# Altium footprint library CustomCase.PcbLib: 411 footprints (part 9 of 26)
Each footprint in its own frame and in the unit in brackets; x right, y up, seen from the top. Pads: shape width x height; smd on the part's side, far side on the other; paste and mask are expansions set on the pad; w line width, h text height; cw(c..) or ccw(c..) is an arc to the next point about the centre after c.
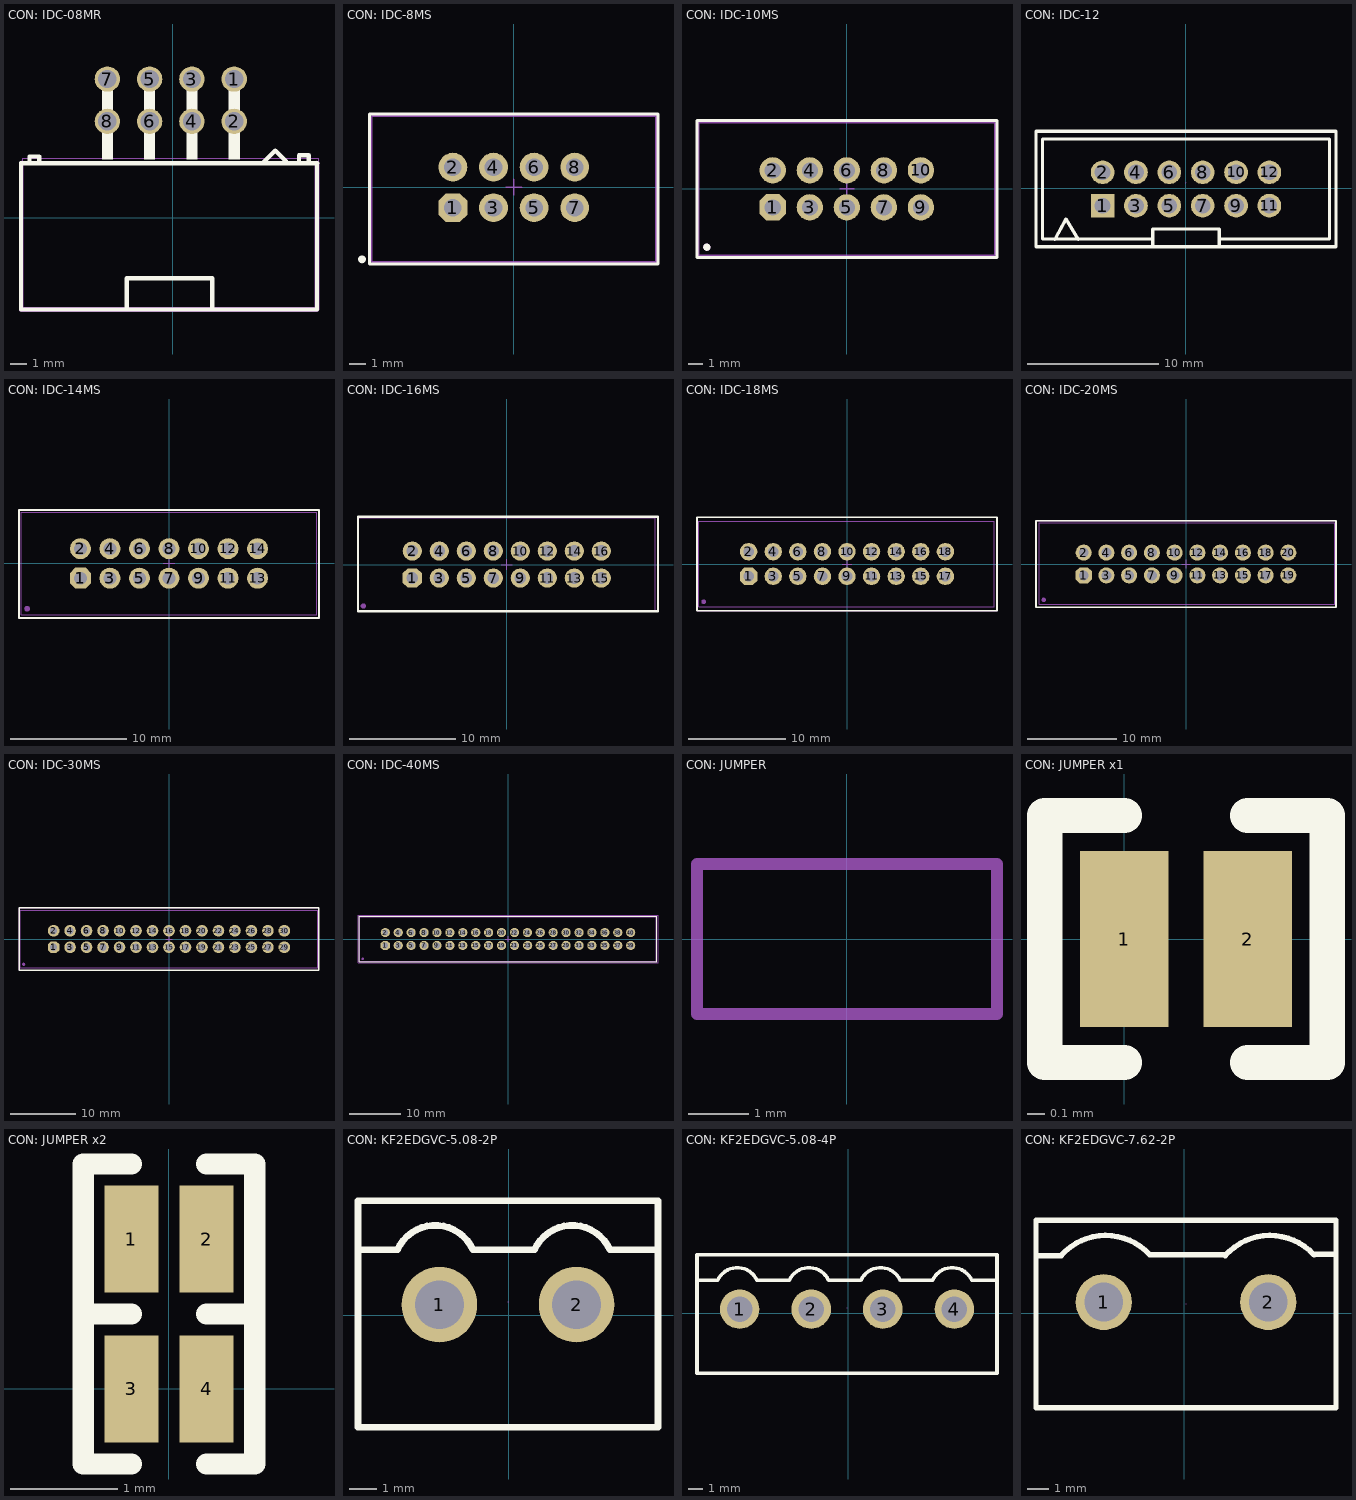
[diagram p8: the footprints below, top view; thin cyan lines are the x and y axes]

## CON: IDC-08MR [mil]
pads (8):
  round 60 hole 43.3: 1(145.59,328.15) 2(145.59,228.15) 3(45.59,328.15) 4(45.59,228.15) 5(-54.41,328.15) 6(-54.41,228.15) 7(-154.41,328.15) 8(-154.41,228.15)
Top Overlay:
  region: 158.19,340.75 132.99,340.75 132.99,138.35 158.19,138.35
  region: 58.19,340.75 32.99,340.75 32.99,138.35 58.19,138.35
  region: -41.81,340.75 -67.01,340.75 -67.01,138.35 -41.81,138.35
  region: -141.81,340.75 -167.01,340.75 -167.01,138.35 -141.81,138.35
  lines w10: -358.31,129.65 -358.31,-216.85 341.09,-216.85 341.09,129.65 ; -357.41,129.15 341.89,129.15 ; -338.41,129.15 -338.41,145.15 -315.41,145.15 -315.41,128.15 ; -109.41,-215.85 -108.41,-214.85 -108.41,-142.85 91.59,-142.85 ; 93.59,-142.85 93.59,-213.85 94.59,-214.85 ; 215.59,131.15 215.59,132.15 242.59,159.15 267.59,134.15 ; 298.59,132.15 298.59,148.15 321.59,148.15 321.59,131.15
Bottom Assy:
  region: -363.31,129.65 -363.31,-216.85 -362.91,-218.75 -361.81,-220.35 -360.21,-221.45 -358.31,-221.85 341.09,-221.85 342.99,-221.45 344.59,-220.35 345.69,-218.75 346.09,-216.85 346.09,129.65 345.69,131.55 344.59,133.15 342.99,134.25 341.09,134.65 339.09,134.25 337.49,133.15 336.39,131.55 336.09,129.65 336.09,-211.85 -353.31,-211.85 -353.31,129.65 -353.71,131.55 -354.81,133.15 -356.41,134.25 -358.31,134.65 -360.21,134.25 -361.81,133.15 -362.91,131.55
Mechanical 6:
  lines w2: -354.61,-213.95 345.79,-213.95 345.79,140.35 -354.61,140.35 -354.61,-213.95
Top Designator:
  region: -141.81,340.75 -167.01,340.75 -167.01,315.55 -141.81,315.55
  region: 158.19,240.75 132.99,240.75 132.99,215.55 158.19,215.55
  region: 158.19,340.75 132.99,340.75 132.99,315.55 158.19,315.55
  region: 58.19,240.75 32.99,240.75 32.99,215.55 58.19,215.55
  region: 58.19,340.75 32.99,340.75 32.99,315.55 58.19,315.55
  region: -41.81,240.75 -67.01,240.75 -67.01,215.55 -41.81,215.55
  region: -41.81,340.75 -67.01,340.75 -67.01,315.55 -41.81,315.55
  region: -141.81,240.75 -167.01,240.75 -167.01,215.55 -141.81,215.55
3D body "IDC-8MR.STEP": height 360.24, standoff -114.96, extent -354.53,-180.51 345.47,339.96

## CON: IDC-8MS [mm]
height 10
pads (9):
  oct 1.8x1.8 hole 1.1: 1(-3.81,-1.27)
  round 1.8 hole 1.1: 2(-3.81,1.27) 3(-1.27,-1.27) 4(-1.27,1.27) 5(1.27,-1.27) 6(1.27,1.27) 7(3.81,-1.27) 8(3.81,1.27)
  round 0.5 on Top Overlay: ""(-9.5,-4.5)
Top Overlay:
  lines w0.2: -9.025,-4.8 9.025,-4.8 9.025,4.6 -9.025,4.6 -9.025,-4.8
Top Assy:
  lines w0.1: -8.89,-4.65 8.89,-4.65 8.89,4.45 -8.89,4.45 -8.89,-4.65
Size Area:
  lines w0.1: -0.5,0 0.5,0 ; 0,-0.5 0,0.5 ; -8.975,-4.75 8.975,-4.75 8.975,4.55 -8.975,4.55 -8.975,-4.75
3D body "6666.STEP": height 8.9, standoff -3.2, extent -8.89,-4.65 8.89,4.45

## CON: IDC-10MS [mm] "IDC-10MS 10 pin PCB-mount header"
height 10
pads (12):
  oct 1.8x1.8 hole 1.1: 1(-5.08,-1.27)
  round 1.8 hole 1.1: 2(-5.08,1.27) 3(-2.54,-1.27) 4(-2.54,1.27) 5(0,-1.27) 6(0,1.27) 7(2.54,-1.27) 8(2.54,1.27) 9(5.08,-1.27) 10(5.08,1.27)
  round 0.5 on Mech1: ""(-9.6,-4)
  round 0.5 on Top Overlay: ""(-9.6,-4)
Top Overlay:
  lines w0.2: -10.275,-4.7 -10.275,4.675 10.3,4.675 10.3,-4.7 -10.275,-4.7
Top Assy:
  lines w0.1: -10.14,-4.572 10.16,-4.572 10.16,4.528 -10.14,4.528 -10.14,-4.572
Size Area:
  lines w0.1: -0.5,0 0.5,0 ; 0,-0.5 0,0.5 ; -10.225,-4.65 -10.225,4.625 10.25,4.625 10.25,-4.65 -10.225,-4.65
3D body "IDC-10MS.STEP": height 9, standoff -3.1, extent -10.14,-4.572 10.16,4.528

## CON: IDC-12 [mm]
pads (12):
  rect 1.8x1.8 hole 1.2: 1(-6.335,-1.311)
  round 1.8 hole 1.2: 2(-6.335,1.229) 3(-3.795,-1.311) 4(-3.795,1.229) 5(-1.255,-1.311) 6(-1.255,1.229) 7(1.285,-1.311) 8(1.285,1.229) 9(3.825,-1.311) 10(3.825,1.229) 11(6.359,-1.306) 12(6.365,1.229)
Top Overlay:
  lines w0.254: -9.975,-3.862 -9.129,-2.327 -8.197,-3.862 ; -2.525,-4.359 -2.525,-3.089 2.555,-3.089 2.555,-4.359 ; -2.525,-3.851 -10.907,-3.851 -10.907,3.769 10.937,3.769 10.937,-3.851 2.555,-3.851 ; -11.405,-4.441 11.435,-4.441 11.435,4.359 -11.405,4.359 -11.405,-4.441
Size Area:
  lines w0.003: -0.01,0.369 0.04,0.42
3D body "IDC-12way.STEP": height 8.9, standoff -3.2, extent -11.415,-4.466 11.445,4.634

## CON: IDC-14MS [mm] "IDC-14MS connector"
height 9
pads (15):
  oct 1.8x1.8 hole 1.1: 1(-7.62,-1.27)
  round 1.8 hole 1.1: 2(-7.62,1.27) 3(-5.08,-1.27) 4(-5.08,1.27) 5(-2.54,-1.27) 6(-2.54,1.27) 7(0,-1.27) 8(0,1.27) 9(2.54,-1.27) 10(2.54,1.27) 11(5.08,-1.27) 12(5.08,1.27) 13(7.62,-1.27) 14(7.62,1.27)
  round 0.5 on Mech1: 38(-12.2,-3.9)
Top Overlay:
  lines w0.2: -12.9,-4.7 -12.9,4.6 12.9,4.6 12.9,-4.7 -12.9,-4.7
Top Assy:
  lines w0.1: -12.7,-4.4 12.7,-4.4 12.7,4.4 -12.7,4.4 -12.7,-4.4
Size Area:
  lines w0.1: -0.5,0 0.5,0 ; 0,-0.5 0,0.5 ; -12.9,-4.7 -12.9,4.6 12.9,4.6 12.9,-4.7 -12.9,-4.7
3D body "IDC-14MS.STEP": height 9.1, standoff -3, extent -12.715,-4.4 12.715,4.4

## CON: IDC-16MS [mm] "IDC-16MS straight leads pcb mount"
height 9
pads (17):
  oct 1.8x1.8 hole 1.1: 1(-8.89,-1.27)
  round 1.8 hole 1.1: 2(-8.89,1.27) 3(-6.35,-1.27) 4(-6.35,1.27) 5(-3.81,-1.27) 6(-3.81,1.27) 7(-1.27,-1.27) 8(-1.27,1.27) 9(1.27,-1.27) 10(1.27,1.27) 11(3.81,-1.27) 12(3.81,1.27) 13(6.35,-1.27) 14(6.35,1.27) 15(8.89,-1.27) 16(8.89,1.27)
  round 0.5 on Mech1: 39(-13.5,-3.9)
Top Overlay:
  lines w0.2: -14,-4.4 -14,4.5 14.224,4.5 14.224,-4.4 -14,-4.4
Top Assy:
  lines w0.1: -13.985,-4.4 13.985,-4.4 13.985,4.4 -13.985,4.4 -13.985,4.285 -13.985,-4.4
Size Area:
  lines w0.1: -0.5,0 0.5,0 ; 0,-0.5 0,0.5 ; -14,-4.4 -14,4.5 14.224,4.5 14.224,-4.4 -14,-4.4
3D body "IDC-16MS.STEP": height 9.1, standoff -3, extent -13.985,-4.4 13.985,4.4

## CON: IDC-18MS [mm]
height 10
pads (19):
  oct 1.8x1.8 hole 1.1: 1(-10.16,-1.27)
  round 1.8 hole 1.1: 2(-10.16,1.27) 3(-7.62,-1.27) 4(-7.62,1.27) 5(-5.08,-1.27) 6(-5.08,1.27) 7(-2.54,-1.27) 8(-2.54,1.27) 9(0,-1.27) 10(0,1.27) 11(2.54,-1.27) 12(2.54,1.27) 13(5.08,-1.27) 14(5.08,1.27) 15(7.62,-1.27) 16(7.62,1.27) 17(10.16,-1.27) 18(10.16,1.27)
  round 0.5 on Mech1: 40(-14.8,-3.9)
Top Overlay:
  lines w0.2: -15.494,-4.826 -15.494,4.826 15.494,4.826 15.494,-4.826 -15.494,-4.826
Top Assy:
  lines w0.1: -15.3,-4.4 15.2,-4.4 15.2,4.4 -15.3,4.4 -15.3,-4.4
Size Area:
  lines w0.1: -0.5,0 0.5,0 ; 0,-0.5 0,0.5 ; -15.494,-4.826 -15.494,4.826 15.494,4.826 15.494,-4.826 -15.494,-4.826
3D body "IDC-18MS.STEP": height 10.54, standoff -1, extent -15.28,-4.378 15.23,4.422

## CON: IDC-20MS [mm]
height 10
pads (21):
  oct 1.8x1.8 hole 1.1: 1(-11.43,-1.27)
  round 1.8 hole 1.1: 2(-11.43,1.27) 3(-8.89,-1.27) 4(-8.89,1.27) 5(-6.35,-1.27) 6(-6.35,1.27) 7(-3.81,-1.27) 8(-3.81,1.27) 9(-1.27,-1.27) 10(-1.27,1.27) 11(1.27,-1.27) 12(1.27,1.27) 13(3.81,-1.27) 14(3.81,1.27) 15(6.35,-1.27) 16(6.35,1.27) 17(8.89,-1.27) 18(8.89,1.27) 19(11.43,-1.27) 20(11.43,1.27)
  round 0.5 on Mech1: 41(-15.9,-4)
Top Overlay:
  lines w0.2: -16.764,-4.826 -16.764,4.826 16.764,4.826 16.764,-4.826 -16.764,-4.826
Top Assy:
  lines w0.1: -16.4,-4.5 16.6,-4.5 16.6,4.6 -16.4,4.6 -16.4,-4.5
Size Area:
  lines w0.1: -0.5,0 0.5,0 ; 0,-0.5 0,0.5 ; -16.764,-4.826 -16.764,4.826 16.764,4.826 16.764,-4.826 -16.764,-4.826
3D body "IDC-20MS.STEP": height 9, standoff -3, extent -16.43,-4.52 16.57,4.58

## CON: IDC-30MS [mm]
height 10
pads (31):
  oct 1.8x1.8 hole 1.1: 1(-17.78,-1.27)
  round 1.8 hole 1.1: 2(-17.78,1.27) 3(-15.24,-1.27) 4(-15.24,1.27) 5(-12.7,-1.27) 6(-12.7,1.27) 7(-10.16,-1.27) 8(-10.16,1.27) 9(-7.62,-1.27) 10(-7.62,1.27) 11(-5.08,-1.27) 12(-5.08,1.27) 13(-2.54,-1.27) 14(-2.54,1.27) 15(0,-1.27) 16(0,1.27) 17(2.54,-1.27) 18(2.54,1.27) 19(5.08,-1.27) 20(5.08,1.27) 21(7.62,-1.27) 22(7.62,1.27) 23(10.16,-1.27) 24(10.16,1.27) 25(12.7,-1.27) 26(12.7,1.27) 27(15.24,-1.27) 28(15.24,1.27) 29(17.78,-1.27) 30(17.78,1.27)
  round 0.5 on Mech1: 42(-22.4,-3.9)
Top Overlay:
  lines w0.2: -23.114,-4.826 -23.114,4.826 23.114,4.826 23.114,-4.826 -23.114,-4.826
Top Assy:
  lines w0.1: -22.9,-4.4 22.9,-4.4 22.9,4.4 -22.9,4.4 -22.9,-4.4
Size Area:
  lines w0.1: -0.5,0 0.5,0 ; 0,-0.5 0,0.5 ; -23.114,-4.826 -23.114,4.826 23.114,4.826 23.114,-4.826 -23.114,-4.826
3D body "IDC-30MS.STEP": height 8.78, standoff -3, extent -22.881,-4.392 22.869,4.408

## CON: IDC-40MS [mm]
height 10
pads (41):
  oct 1.8x1.8 hole 1.1: 1(-24.13,-1.27)
  round 1.8 hole 1.1: 2(-24.13,1.27) 3(-21.59,-1.27) 4(-21.59,1.27) 5(-19.05,-1.27) 6(-19.05,1.27) 7(-16.51,-1.27) 8(-16.51,1.27) 9(-13.97,-1.27) 10(-13.97,1.27) 11(-11.43,-1.27) 12(-11.43,1.27) 13(-8.89,-1.27) 14(-8.89,1.27) 15(-6.35,-1.27) 16(-6.35,1.27) 17(-3.81,-1.27) 18(-3.81,1.27) 19(-1.27,-1.27) 20(-1.27,1.27) 21(1.27,-1.27) 22(1.27,1.27) 23(3.87,-1.27) 24(3.81,1.27) 25(6.35,-1.27) 26(6.35,1.27) 27(8.89,-1.27) 28(8.89,1.27) 29(11.43,-1.27) 30(11.43,1.27) 31(13.97,-1.27) 32(13.97,1.27) 33(16.51,-1.27) 34(16.51,1.27) 35(19.05,-1.27) 36(19.05,1.27) 37(21.59,-1.27) 38(21.59,1.27) 39(24.13,-1.27) 40(24.13,1.27)
  round 0.5 on Mech1: 43(-28.6,-3.9)
Top Overlay:
  lines w0.2: -29.3,-4.5 29.3,-4.5 29.3,4.5 -29.3,4.5 -29.3,-4.5
Top Assy:
  lines w0.1: -29.2,-4.4 -29.2,4.4 29.2,4.4 29.2,-4.4 -29.2,-4.4
Size Area:
  lines w0.1: -0.5,0 0.5,0 ; 0,-0.5 0,0.5 ; -29.5,-4.7 29.5,-4.7 29.5,4.7 -29.5,4.7 -29.5,-4.7
3D body "IDC-40MS.STEP": height 8.78, standoff -3, extent -29.225,-4.4 29.225,4.4

## CON: JUMPER [mm]
Top Assy:
  lines w0.2: -2.5,-1.25 1,-1.25 2.5,-1.25 2.5,1.25 1,1.25 -2.5,1.25 -2.5,-1.25
3D body "JUMPER.step": height 6.5, standoff 0, extent -2.5,-1.175 2.5,1.175

## CON: JUMPER x1 [mm]
pads (2):
  rect 0.5x1 smd: 1(0,0) 2(0.7,0)
Top Overlay:
  lines w0.2: 0,-0.7 -0.45,-0.7 -0.45,0.7 0,0.7 ; 0.7,-0.7 1.15,-0.7 1.15,0.7 0.7,0.7

## CON: JUMPER x2 [mm]
pads (4):
  rect 0.5x1 smd: 1(-0.35,1.4) 2(0.35,1.4) 3(-0.35,0) 4(0.35,0)
Top Overlay:
  lines w0.2: -0.35,-0.7 -0.8,-0.7 -0.8,0.7 ; -0.35,2.1 -0.8,2.1 -0.8,0.7 ; 0.35,-0.7 0.8,-0.7 0.8,0.7 ; 0.35,2.1 0.8,2.1 0.8,0.7 ; -0.8,0.7 -0.35,0.7 -0.8,0.7 ; 0.8,0.7 0.35,0.7 0.8,0.7

## CON: KF2EDGVC-5.08-2P [mm]
pads (2):
  round 2.8 hole 1.8: 1(-2.564,0.403) 2(2.516,0.403)
Top Overlay:
  lines w0.254: -5.584,2.435 -4.121,2.435 cw(c-2.724,1.81) -1.327,2.435 0.959,2.435 cw(c2.356,1.81) 3.753,2.435 5.536,2.435 ; -5.584,-4.147 5.536,-4.147 5.536,4.253 -5.584,4.253 -5.584,-4.147
Size Area:
  lines w0.003: -0.024,0.509 -0.024,0.51
3D body "5.08_2P.stp": height 12, standoff -3.9, extent -6.104,-4.347 6.056,4.253

## CON: KF2EDGVC-5.08-4P [mm]
pads (4):
  round 2.8 hole 1.8: 1(-7.709,0.284) 2(-2.629,0.284) 3(2.451,0.284) 4(7.531,0.284)
Top Overlay:
  lines w0.254: -10.729,2.316 -9.266,2.316 cw(c-7.869,1.691) -6.472,2.316 -4.186,2.316 cw(c-2.789,1.691) -1.392,2.316 0.894,2.316 cw(c2.291,1.691) 3.688,2.316 5.974,2.316 cw(c7.371,1.691) 8.768,2.316 10.551,2.316 ; -10.729,-4.266 -10.729,4.134 10.551,4.134 10.551,-4.266 -10.729,-4.266
Size Area:
  lines w0.003: -0.089,0.39 -0.089,0.391
3D body "5.08_4P.stp": height 12, standoff -3.9, extent -11.249,-4.466 11.071,4.134

## CON: KF2EDGVC-7.62-2P [mm]
pads (2):
  round 2.6 hole 1.8: 1(-3.737,0.505) 2(3.883,0.505)
Top Overlay:
  lines w0.254: -6.877,2.665 -5.717,2.665 cw(c-3.643,0.819) -1.597,2.695 1.889,2.691 ; 1.889,2.665 cw(c3.963,0.819) 6.009,2.695 ; 6.01,2.721 7.023,2.721 ; -6.877,-4.395 7.023,-4.395 7.023,4.305 -6.877,4.305 -6.877,-4.395
Size Area:
  lines w0.003: 0.073,0.436 0.073,0.436
3D body "1766770.stp": height 12, standoff -3.9, extent -7.547,-4.395 7.693,4.205